# Altium footprint library NTS_Passives.PcbLib: 15 footprints
Each footprint in its own frame and in the unit in brackets; x right, y up, seen from the top. Pads: shape width x height; smd on the part's side, far side on the other; paste and mask are expansions set on the pad; w line width, h text height; cw(c..) or ccw(c..) is an arc to the next point about the centre after c.
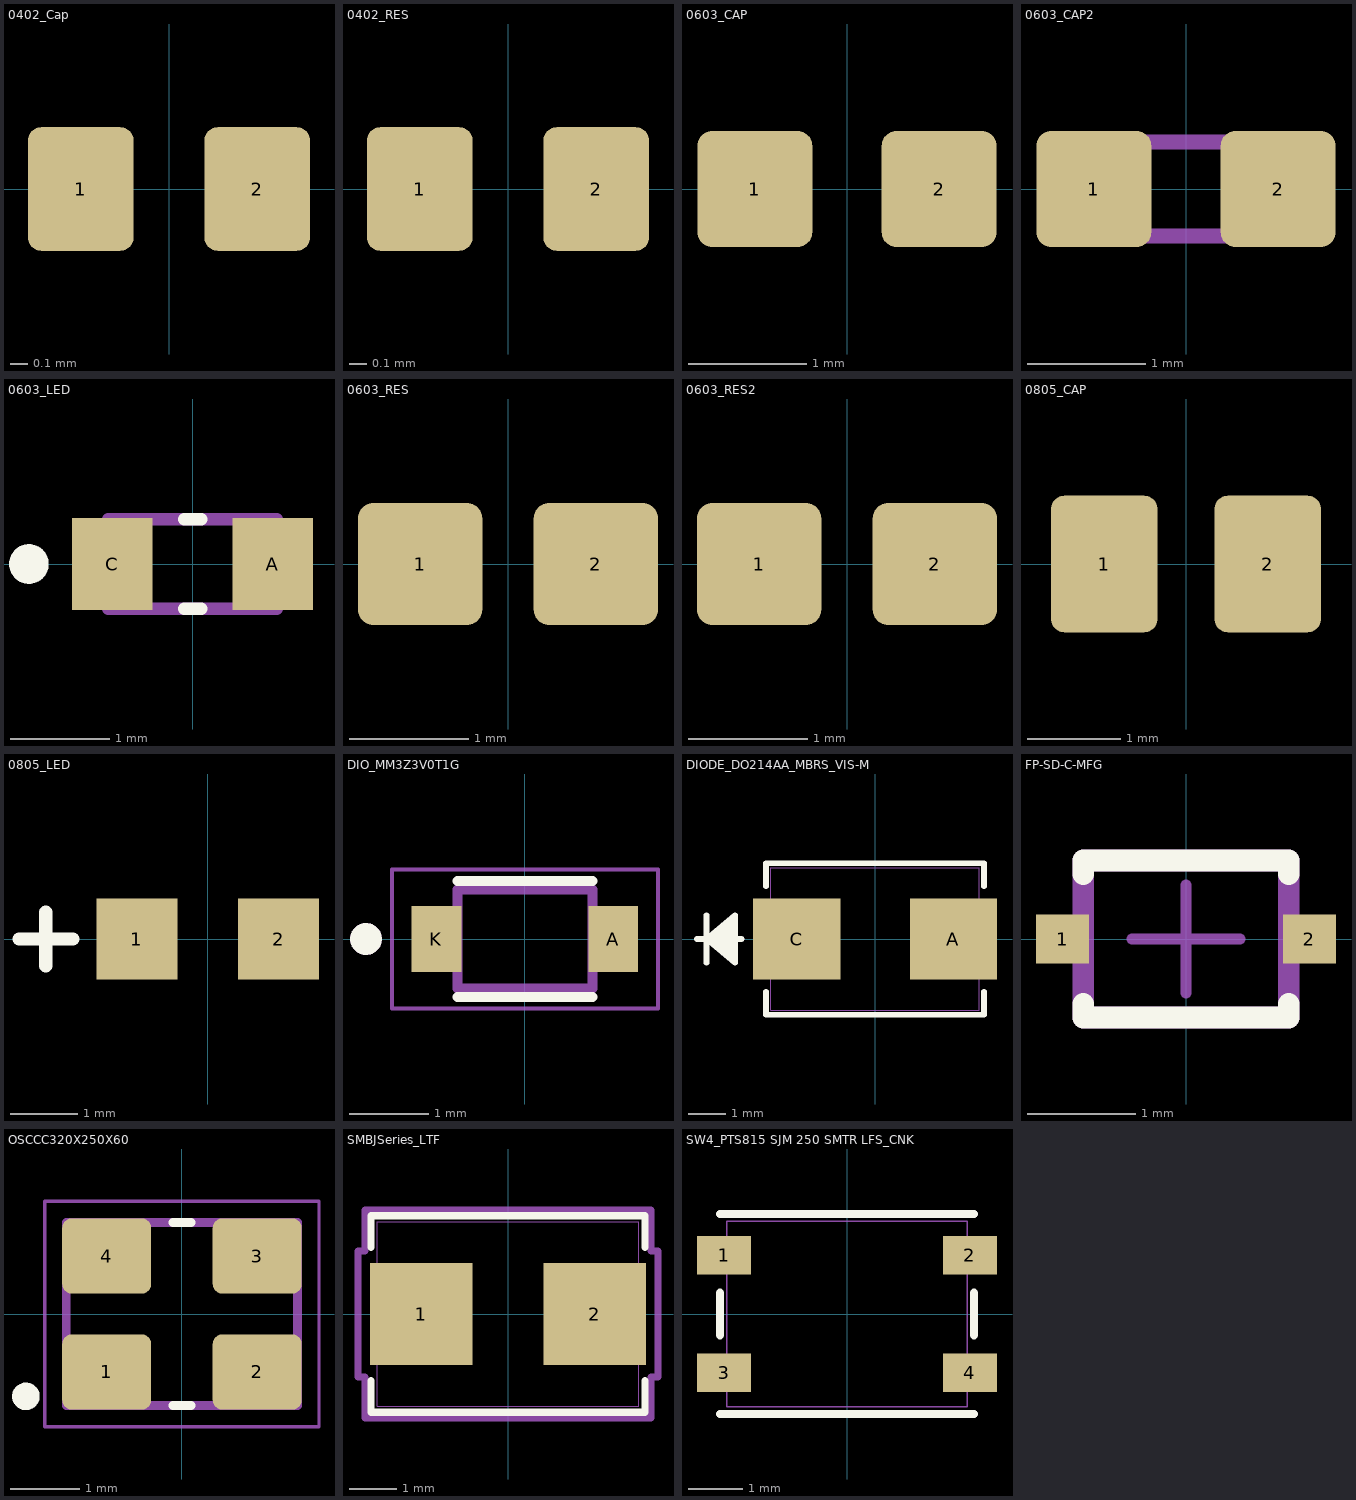
[diagram p0: the footprints below, top view; thin cyan lines are the x and y axes]

## 0402_Cap [mm]
pads (2):
  rrect25% 0.6x0.7 smd paste+0 mask+0.051: 1(-0.5,0) 2(0.5,0)
3D body "step_temp.STEP": height 0.55, standoff 0, extent -0.5,-0.25 0.5,0.25

## 0402_RES [mm]
pads (2):
  rrect25% 0.6x0.7 smd paste+0 mask+0.051: 1(-0.5,0) 2(0.5,0)
3D body "step_temp.STEP": height 0.4, standoff 0, extent -0.5,-0.25 0.5,0.25

## 0603_CAP [mm]
pads (2):
  rrect25% 0.972x0.981 smd mask+0.051: 1(-0.78,0) 2(0.78,0)
3D body "step_temp.STEP": height 0.9, standoff 0, extent -0.8,-0.4 0.8,0.4

## 0603_CAP2 [mm]
pads (2):
  rrect25% 0.972x0.981 smd mask+0.051: 1(-0.78,0) 2(0.78,0)
Top 3D Body:
  lines w0.127: -0.8,-0.4 -0.8,0.4 0.8,0.4 0.8,-0.4 -0.8,-0.4
3D body "step_temp.STEP": height 0.9, standoff 0, extent -0.8,-0.4 0.8,0.4

## 0603_LED [mm]
pads (2):
  rect 0.81x0.93 smd: A(0.81,0) C(-0.81,0)
Top Overlay:
  circle w0.2: c-1.651,0 r0.1
  lines w0.127: -0.085,-0.45 0.085,-0.45 ; -0.085,0.45 0.085,0.45
Mechanical 13:
  lines w0.127: -0.85,-0.45 0.85,-0.45 0.85,0.45 -0.85,0.45 -0.85,-0.45
3D body "KT-0603R--3DModel-STEP-269445.STEP": height 0.65, standoff 0, extent -0.8,-0.4 0.8,0.4

## 0603_RES [mm]
pads (2):
  rrect25% 1.04x1.02 smd mask+0.051: 1(-0.735,0) 2(0.735,0)
3D body "step_temp.STEP": height 0.55, standoff 0, extent -0.8,-0.4 0.8,0.4

## 0603_RES2 [mm]
pads (2):
  rrect25% 1.04x1.02 smd mask+0.051: 1(-0.735,0) 2(0.735,0)
3D body "step_temp.STEP": height 0.55, standoff 0, extent -0.8,-0.4 0.8,0.4

## 0805_CAP [mm]
pads (2):
  rrect25% 1.15x1.47 smd mask+0.051: 1(-0.88,0) 2(0.88,0)
3D body "step_temp.STEP": height 1.45, standoff 0, extent -1,-0.625 1,0.625

## 0805_LED [mm]
pads (2):
  rect 1.2x1.2 smd: 1(-1.05,0) 2(1.05,0)
Top Overlay:
  lines w0.2: -2.8,0 -2,0 ; -2.4,-0.4 -2.4,0.4
3D body: height 0.8, standoff 0, extent -1,-0.65 1,0.65

## DIO_MM3Z3V0T1G [mm]
pads (2):
  rect 0.625x0.83 smd: A(1.112,0) K(-1.112,0)
Top Overlay:
  circle w0.2: c-2,0 r0.1
  lines w0.127: -0.85,-0.728 0.85,-0.728 ; -0.85,0.728 0.85,0.728
Mechanical 13:
  circle w0.2: c-2,0 r0.1
  lines w0.127: -0.85,-0.625 0.85,-0.625 0.85,0.625 -0.85,0.625 -0.85,-0.625
Mechanical 15:
  lines w0.05: -1.675,-0.875 1.675,-0.875 1.675,0.875 -1.675,0.875 -1.675,-0.875
3D body "step_temp.STEP": height 1, standoff 0, extent -1.25,-0.619 1.25,0.619

## DIODE_DO214AA_MBRS_VIS-M [mil]
pads (2):
  rect 92x85 smd paste+0 mask+0: A(82.68,0) C(-82.68,0)
Top Overlay:
  lines w6: -187.87,0 -140.97,0 ; -177.87,-25 -177.87,25 ; -147.87,-20 -177.87,0 ; -147.87,-15 -177.87,0 ; -147.87,-10 -177.87,0 ; -147.87,-5 -177.87,0 ; -147.87,5 -177.87,0 ; -147.87,10 -177.87,0 ; -147.87,15 -177.87,0 ; -147.87,20 -177.87,0 ; -115,-55.6 -115,-80 115,-80 115,-55.6 ; -115,55.6 -115,80 115,80 115,55.6 ; -177.87,0 -147.87,-25 -147.87,25 -177.87,0
Mechanical 13:
  lines w1: -187.87,0 -137.87,0 ; -177.87,-25 -177.87,25 ; -147.87,-20 -177.87,0 ; -147.87,-15 -177.87,0 ; -147.87,-10 -177.87,0 ; -147.87,-5 -177.87,0 ; -147.87,5 -177.87,0 ; -147.87,10 -177.87,0 ; -147.87,15 -177.87,0 ; -147.87,20 -177.87,0 ; -177.87,0 -147.87,-25 -147.87,25 -177.87,0 ; -110,-75 -110,75 110,75 110,-75 -110,-75
3D body "DIODE_DO214AA_MBRS_VIS.step": height 95.98, standoff 0, extent -110,-75 110,75

## FP-SD-C-MFG [mm]
pads (2):
  rect 0.49x0.45 smd paste+0 mask+0: 1(-1.14,0) 2(1.14,0)
Top Overlay:
  lines w0.2: -0.95,-0.6 -0.95,-0.725 0.95,-0.725 0.95,-0.6 ; -0.95,0.6 -0.95,0.725 0.95,0.725 0.95,0.6
Top 3D Body:
  lines w0.2: -0.95,-0.725 0.95,-0.725 0.95,0.725 -0.95,0.725 -0.95,-0.725
Top Component Center:
  lines w0.1: -0.5,0 0.5,0 ; 0,-0.5 0,0.5
3D body "Diode_Littelfuse_SD24C-01FTG_eec.STEP": height 0.25, standoff 0, extent -1.485,-0.825 1.485,0.825

## OSCCC320X250X60 [mm]
pads (4):
  rrect25% 1.29x1.09 smd mask+0.051: 1(-1.09,-0.84) 2(1.09,-0.84) 3(1.09,0.84) 4(-1.09,0.84)
Top Overlay:
  circle w0.2: c-2.261,-1.194 r0.1
  lines w0.127: -0.132,-1.325 0.132,-1.325 ; -0.132,1.325 0.132,1.325
Top 3D Body:
  lines w0.127: -1.675,-1.325 -1.675,1.325 1.675,1.325 1.675,-1.325 -1.675,-1.325
Mechanical 15:
  lines w0.05: -1.985,-1.635 -1.985,1.635 1.985,1.635 1.985,-1.635 -1.985,-1.635
3D body "TSX-3225 24.0000MF15X-AC3.STEP": height 0.6, standoff 0, extent -1.6,-1.25 1.6,1.25

## SMBJSeries_LTF [mil]
pads (2):
  rect 86x86 smd paste+0 mask+2: 1(-73,0) 2(73,0)
Top Overlay:
  lines w6: -115,-56.1 -115,-82.5 115,-82.5 115,-56.1 ; -115,56.1 -115,82.5 115,82.5 115,56.1
Top 3D Body:
  lines w1: -110,-77.5 110,-77.5 110,77.5 -110,77.5 -110,-77.5
Mechanical 15:
  lines w6: -126,-53 -126,53 -120,53 -120,87.5 120,87.5 120,53 126,53 126,-53 120,-53 120,-87.5 -120,-87.5 -120,-53 -126,-53
3D body "SMBJSeries_LTF.step": height 97.99, standoff 0, extent -110,-77.48 110,77.48

## SW4_PTS815 SJM 250 SMTR LFS_CNK [mm]
pads (4):
  rect 0.991x0.711 smd paste+0 mask+0.051: 1(-2.25,1.075) 2(2.25,1.075) 3(-2.25,-1.075) 4(2.25,-1.075)
Top Overlay:
  lines w0.152: -2.324,-1.829 2.324,-1.829 ; -2.324,-0.387 -2.324,0.387 ; -2.324,1.829 2.324,1.829 ; 2.324,-0.387 2.324,0.387
Mechanical 13:
  lines w0.025: -2.197,-1.702 -2.197,1.702 2.197,1.702 2.197,-1.702 -2.197,-1.702
3D body "PTS810SJM250SMTR LFS.STEP": height 2.7, standoff 0, extent -2.3,-1.6 2.3,1.6